# EAGLE library part DW01A (library C3_SCOUT_REVC)
PUOLOP DW01A / C351410. SOT23-6 cell protection; 2.5 V cutoff, 2.9 V recovery, supports depleted-cell charging. Prototype protection validation required.
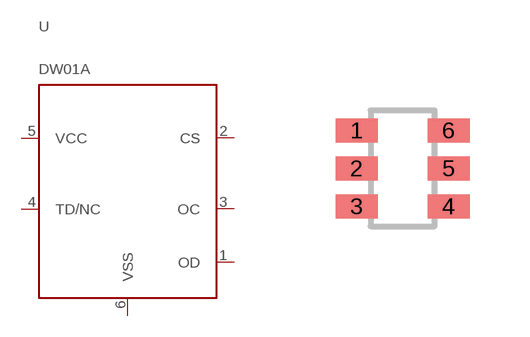
[diagram p1: symbol with the pads of SOT23-6; footprint SOT23-6]

Designator prefix U

## DW01A (LCSC_PART: C351410; MANUFACTURER: PUOLOP; MPN: DW01A)  [SOT23-6]
1  OD  out
2  CS  in
3  OC  out
4  TD/NC  nc
5  VCC  pwr
6  VSS  pwr

## Footprint SOT23-6 (pad centres in mm)
smd 1.05 x 0.6: 1 -1.15,0.95; 2 -1.15,0; 3 -1.15,-0.95; 4 1.15,-0.95; 5 1.15,0; 6 1.15,0.95